# Altium footprint library new-version2.PcbLib: 88 footprints (part 2 of 6)
Each footprint in its own frame and in the unit in brackets; x right, y up, seen from the top. Pads: shape width x height; smd on the part's side, far side on the other; paste and mask are expansions set on the pad; w line width, h text height; cw(c..) or ccw(c..) is an arc to the next point about the centre after c.
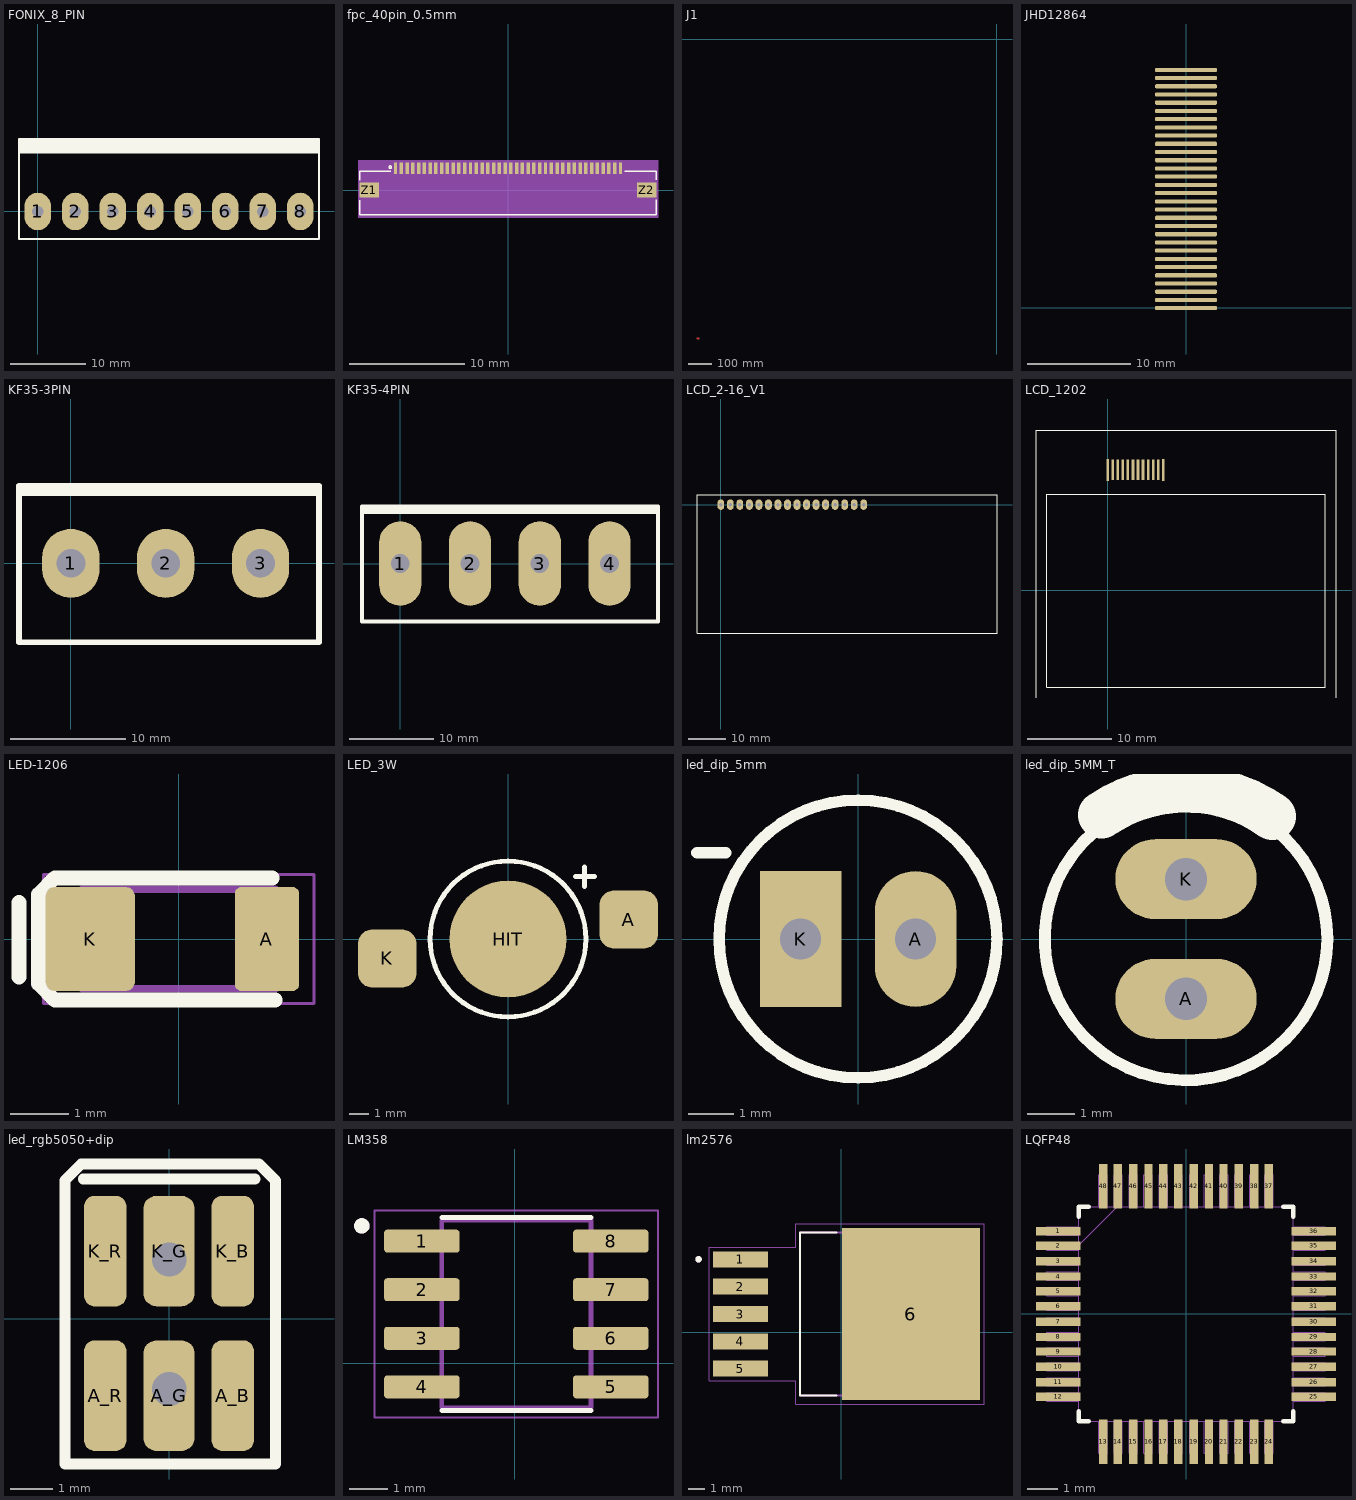
[diagram p1: the footprints below, top view; thin cyan lines are the x and y axes]

## FONIX_8_PIN [mm]
pads (8):
  oval 3.5x5 hole 1.5: 1(0,0) 2(5,0) 3(10,0) 4(15,0) 5(20,0) 6(25,0) 7(30,0) 8(35,0)
Top Overlay:
  rectangle: -2.5,7.747 37.5,9.667
  lines w0.254: -2.5,-3.668 -2.5,9.667 37.5,9.667 37.5,-3.668 -2.5,-3.668

## fpc_40pin_0.5mm [mm]
pads (42):
  rect 0.3x1 smd: 1(-9.751,1.902) 2(-9.251,1.902) 3(-8.751,1.902) 4(-8.251,1.902) 5(-7.751,1.902) 6(-7.251,1.902) 7(-6.751,1.902) 8(-6.251,1.902) 9(-5.751,1.902) 10(-5.251,1.902) 11(-4.751,1.902) 12(-4.251,1.902) 13(-3.751,1.902) 14(-3.251,1.902) 15(-2.751,1.902) 16(-2.251,1.902) 17(-1.751,1.902) 18(-1.251,1.902) 19(-0.751,1.902) 20(-0.251,1.902) 21(0.249,1.902) 22(0.749,1.902) 23(1.249,1.902) 24(1.749,1.902) 25(2.249,1.902) 26(2.749,1.902) 27(3.249,1.902) 28(3.749,1.902) 29(4.249,1.902) 30(4.749,1.902) 31(5.249,1.902) 32(5.749,1.902) 33(6.249,1.902) 34(6.749,1.902) 35(7.249,1.902) 36(7.749,1.902) 37(8.249,1.902) 38(8.749,1.902) 39(9.249,1.902) 40(9.749,1.902)
  rect 1.65x1.3 smd: Z1(-12.026,0.002) Z2(12.024,0.002)
Top Overlay:
  circle w0.127: c-10.201,2.002 r0.1
  lines w0.127: -12.851,-0.888 -12.851,-2.148 12.849,-2.148 12.849,-0.838 ; -12.851,0.862 -12.851,1.652 -10.171,1.652 ; 10.109,1.652 12.849,1.652 12.849,0.882
Mechanical 13:
  lines w0.127: -12.851,-2.148 -12.851,1.652 12.849,1.652 12.849,-2.148 -12.851,-2.148
Mechanical 15:
  region: 12.999,-2.398 -13.001,-2.398 -13.001,2.602 12.999,2.602
3D body "fpc_40pin_0.5mm.stp": height -0.4, standoff -1.69, extent -12.873,-2.216 12.827,2.034

## J1 [mm]
Top Layer:
  drawing of 25768 lines, arcs and shapes, not listed
Top Overlay:
  drawing of 321 lines, arcs and shapes, not listed

## JHD12864 [mm]
pads (30):
  rrect50% 6x0.4 smd: 1(-0.004,-0.018) 2(-0.004,0.782) 3(-0.004,1.582) 4(-0.004,2.382) 5(-0.004,3.182) 6(-0.004,3.982) 7(-0.004,4.782) 8(-0.004,5.582) 9(-0.004,6.382) 10(-0.004,7.182) 11(-0.004,7.982) 12(-0.004,8.782) 13(-0.004,9.582) 14(-0.004,10.382) 15(-0.004,11.182) 16(-0.004,11.982) 17(-0.004,12.782) 18(-0.004,13.582) 19(-0.004,14.382) 20(-0.004,15.182) 21(-0.004,15.982) 22(-0.004,16.782) 23(-0.004,17.582) 24(-0.004,18.382) 25(-0.004,19.182) 26(-0.004,19.982) 27(-0.004,20.782) 28(-0.004,21.582) 29(-0.004,22.382) 30(-0.004,23.182)

## KF35-3PIN [mm]
pads (3):
  oval 5x6 hole 2.5: 1(0,0) 2(8.25,0) 3(16.5,0)
Top Overlay:
  rectangle: -4.52,5.842 21.59,6.742
  lines w0.5: -4.52,-6.858 21.59,-6.858 21.59,6.742 -4.52,6.742 -4.52,-6.858

## KF35-4PIN [mm]
pads (4):
  oval 5x10 hole 2.2: 1(0,0) 2(8.25,0) 3(16.5,0) 4(24.75,0)
Top Overlay:
  rectangle: -4.52,5.842 30.48,6.742
  lines w0.5: -4.52,-6.858 30.48,-6.858 30.48,6.742 -4.52,6.742 -4.52,-6.858

## LCD_2-16_V1 [mm]
pads (16):
  oval 1.8x2.8 hole 0.9: 1(0,0) 2(2.54,0) 3(5.08,0) 4(7.62,0) 5(10.16,0) 6(12.7,0) 7(15.24,0) 8(17.78,0) 9(20.32,0) 10(22.86,0) 11(25.4,0) 12(27.94,0) 13(30.48,0) 14(33.02,0) 15(35.56,0) 16(38.1,0)
Top Overlay:
  lines w0.254: -6.35,-34.333 73.65,-34.333 73.65,2.667 -6.35,2.667 -6.35,-34.333

## LCD_1202 [mm]
pads (12):
  rect 0.32x2.6 smd: 1(0,14.292) 12(6.6,14.292)
  rect 0.32x2.4 smd: 2(0.6,14.292) 3(1.2,14.292) 4(1.8,14.292) 5(2.4,14.292) 6(3,14.292) 7(3.6,14.292) 8(4.2,14.292) 9(4.8,14.292) 10(5.4,14.292) 11(6,14.292)
Top Overlay:
  lines w0.127: -8.49,-12.745 -8.49,19.005 27.07,19.005 27.07,-12.745 ; -7.22,-11.475 -7.22,11.385 25.8,11.385 25.8,-11.475 -7.22,-11.475
3D body "LCD.STEP": height 3, standoff 0, extent -8.491,-12.746 27.069,18.979

## LED-1206 [mm]
pads (2):
  rrect20% 1.1x1.778 smd: A(1.51,0.003)
  rrect20% 1.524x1.778 smd: K(-1.51,0.003)
Top Overlay:
  lines w0.254: -2.729,-0.644 -2.729,0.626 ; 1.6,1.048 -1.6,1.048 -2.115,1.048 -2.394,0.769 -2.394,-0.763 -2.115,-1.042 -1.65,-1.042 1.65,-1.042
Mechanical 13:
  lines w0.127: -1.65,-0.847 1.65,-0.847 1.65,0.853 -1.65,0.853 -1.65,-0.847
Mechanical 15:
  lines w0.05: -2.31,-1.097 -2.31,1.103 2.31,1.103 2.31,-1.097 -2.31,-1.097

## LED_3W [mm]
pads (3):
  rrect50% 3x3 smd: A(6.2,1) K(-6.2,-1)
  round 6 smd: HIT(0,0)
Top Overlay:
  circle w0.254: c0,0 r4
  lines w0.254: 3.454,3.2 4.454,3.2 ; 3.929,2.692 3.929,3.692

## led_dip_5mm [mm]
pads (2):
  oval 1.8x3 hole 0.9: A(1.27,0)
  rect 1.8x3 hole 0.9: K(-1.27,0)
Top Overlay:
  circle w0.254: c0,0 r3.069
  lines w0.254: -3.556,1.905 -2.921,1.905

## led_dip_5MM_T [mm]
pads (2):
  oval 3x1.7 hole 0.9: A(0,-1.27) K(0,1.27)
Top Overlay:
  circle w0.254: c0,0 r3
  lines w1: -1.797,2.63 cw(c0,0) 1.837,2.602

## led_rgb5050+dip [mm]
pads (8):
  rect 0x0 hole 0.8: 1(0,-1.651)
  round 0 hole 0.8: 2(0,1.397)
  rrect50% 1x2.6 smd: A_B(1.494,-1.804) A_R(-1.506,-1.804) K_B(1.494,1.596) K_R(-1.506,1.596)
  rrect50% 1.2x2.6 smd: A_G(-0.006,-1.804) K_G(-0.006,1.596)
Top Overlay:
  lines w0.254: -2.022,3.291 2.017,3.291 ; -2.455,-3.412 2.497,-3.412 2.497,3.259 2.112,3.644 -2.068,3.644 -2.455,3.257 -2.455,-3.412

## LM358 [mm]
pads (8):
  rrect25% 1.97x0.6 smd: 1(-2.426,3.193) 2(-2.426,1.923) 3(-2.426,0.653) 4(-2.426,-0.617) 5(2.514,-0.617) 6(2.514,0.653) 7(2.514,1.923) 8(2.514,3.193)
Top Overlay:
  circle w0.2: c-3.996,3.593 r0.1
  lines w0.127: -1.906,-1.237 1.994,-1.237 ; -1.906,3.813 1.994,3.813
Mechanical 13:
  circle w0.2: c-3.996,3.593 r0.1
  lines w0.127: -1.906,-1.164 1.994,-1.164 1.994,3.741 -1.906,3.741 -1.906,-1.164
Mechanical 15:
  lines w0.05: -3.661,-1.414 3.749,-1.414 3.749,3.991 -3.661,3.991 -3.661,-1.414

## lm2576 [mm]
pads (6):
  rect 3.4x1 smd paste-3 mask+0: 1(-6.282,4.543) 2(-6.282,2.843) 3(-6.282,1.143) 4(-6.282,-0.557) 5(-6.282,-2.257)
  rect 8.6x10.7 smd paste-6 mask+0: 6(4.318,1.143)
Top Overlay:
  circle w0.2: c-8.882,4.543 r0.1
  lines w0.127: -0.302,-3.937 -2.587,-3.937 -2.587,6.223 -0.302,6.223
Top Paste:
  region: 8.568,-4.157 0.068,-4.157 0.068,6.443 8.568,6.443
  region: -4.632,0.693 -7.932,0.693 -7.932,1.593 -4.632,1.593
  region: -4.632,2.393 -7.932,2.393 -7.932,3.293 -4.632,3.293
  region: -4.632,4.093 -7.932,4.093 -7.932,4.993 -4.632,4.993
  region: -4.632,-1.007 -7.932,-1.007 -7.932,-0.107 -4.632,-0.107
  region: -4.632,-2.707 -7.932,-2.707 -7.932,-1.807 -4.632,-1.807
Top Solder:
  region: 8.688,-4.277 -0.052,-4.277 -0.052,6.563 8.688,6.563
  region: -4.512,0.573 -8.052,0.573 -8.052,1.713 -4.512,1.713
  region: -4.512,2.273 -8.052,2.273 -8.052,3.413 -4.512,3.413
  region: -4.512,3.973 -8.052,3.973 -8.052,5.113 -4.512,5.113
  region: -4.512,-1.127 -8.052,-1.127 -8.052,0.013 -4.512,0.013
  region: -4.512,-2.827 -8.052,-2.827 -8.052,-1.687 -4.512,-1.687
Mechanical 13:
  circle w0.2: c-8.882,4.543 r0.1
  lines w0.127: -2.587,-3.937 -2.587,6.223 6.338,6.223 6.338,-3.937 -2.587,-3.937
Mechanical 15:
  lines w0.05: -8.232,-3.007 -2.837,-3.007 -2.837,-4.457 8.868,-4.457 8.868,6.743 -2.837,6.743 -2.837,5.293 -8.232,5.293 -8.232,-3.007
3D body "LM2576S-12.STEP": height 4.65, standoff -0.15, extent -7.038,-3.92 7.313,6.24

## LQFP48 [mil]
pads (48):
  rect 58x11 smd: 1(-167,107.96) 2(-167,88.96) 3(-167,68.96) 4(-167,48.96) 5(-167,29.96) 6(-167,9.96) 7(-167,-10.04) 8(-167,-30.04) 9(-167,-49.04) 10(-167,-69.04) 11(-167,-89.04) 12(-167,-108.04) 25(167,-108.04) 26(167,-89.04) 27(167,-69.04) 28(167,-49.04) 29(167,-30.04) 30(167,-10.04) 31(167,9.96) 32(167,29.96) 33(167,48.96) 34(167,68.96) 35(167,88.96) 36(167,107.96)
  rect 11x58 smd: 13(-108,-167.04) 14(-89,-167.04) 15(-69,-167.04) 16(-49,-167.04) 17(-30,-167.04) 18(-10,-167.04) 19(10,-167.04) 20(30,-167.04) 21(49,-167.04) 22(69,-167.04) 23(89,-167.04) 24(108,-167.04) 37(108,166.96) 38(89,166.96) 39(69,166.96) 40(49,166.96) 41(30,166.96) 42(10,166.96) 43(-10,166.96) 44(-30,166.96) 45(-49,166.96) 46(-69,166.96) 47(-89,166.96) 48(-108,166.96)
Top Overlay:
  lines w6: -140,-127.04 -140,-140.04 -127,-140.04 ; -140,126.96 -140,139.96 -127,139.96 ; 127,-140.04 140,-140.04 140,-127.04 ; 127,139.96 140,139.96 140,126.96
Mechanical 13:
  drawing of 199 lines, arcs and shapes, not listed
3D body "LQFP48.STEP": height 62.99, standoff 0, extent -176.85,-176.85 177.48,177.48